# Altium schematic symbol library MP-2016-1100-50-70.SchLib: 1 symbol
Pins are listed as number, name and electrical type; pins without a type are passive.

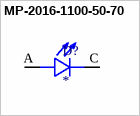
[diagram p0: symbol MP-2016-1100-50-70]

## MP-2016-1100-50-70
designator D?
LED Midpower Lighting series White, Cool 5000K, 80 CRI, 30lm 3V 120mA 110Â°; MF: Luminus Devices; MP: MP-2016-1100-50-70; Check_prices: https://www.snapeda.com/parts/MP-2016-1100-50-70/Luminus+Devices+Inc./view-part/?ref=eda; Price: None; SnapEDA_Link: https://www.snapeda.com/parts/MP-2016-1100-50-70/Luminus+Devices+Inc./view-part/?ref=snap; Purchase-URL: https://pricing.snapeda.com/search/part/MP-2016-1100-50-70/?ref=eda; Value: *; Package: None; Availability: In Stock
footprint LED_MP-2016-1100-50-70
footprint LED_MP-2016-1100-50-70
pins: A, C